# Altium footprint library MY_LIB_Connectors_CONNFLY.PcbLib: 239 footprints (part 9 of 15)
Each footprint in its own frame and in the unit in brackets; x right, y up, seen from the top. Pads: shape width x height; smd on the part's side, far side on the other; paste and mask are expansions set on the pad; w line width, h text height; cw(c..) or ccw(c..) is an arc to the next point about the centre after c.
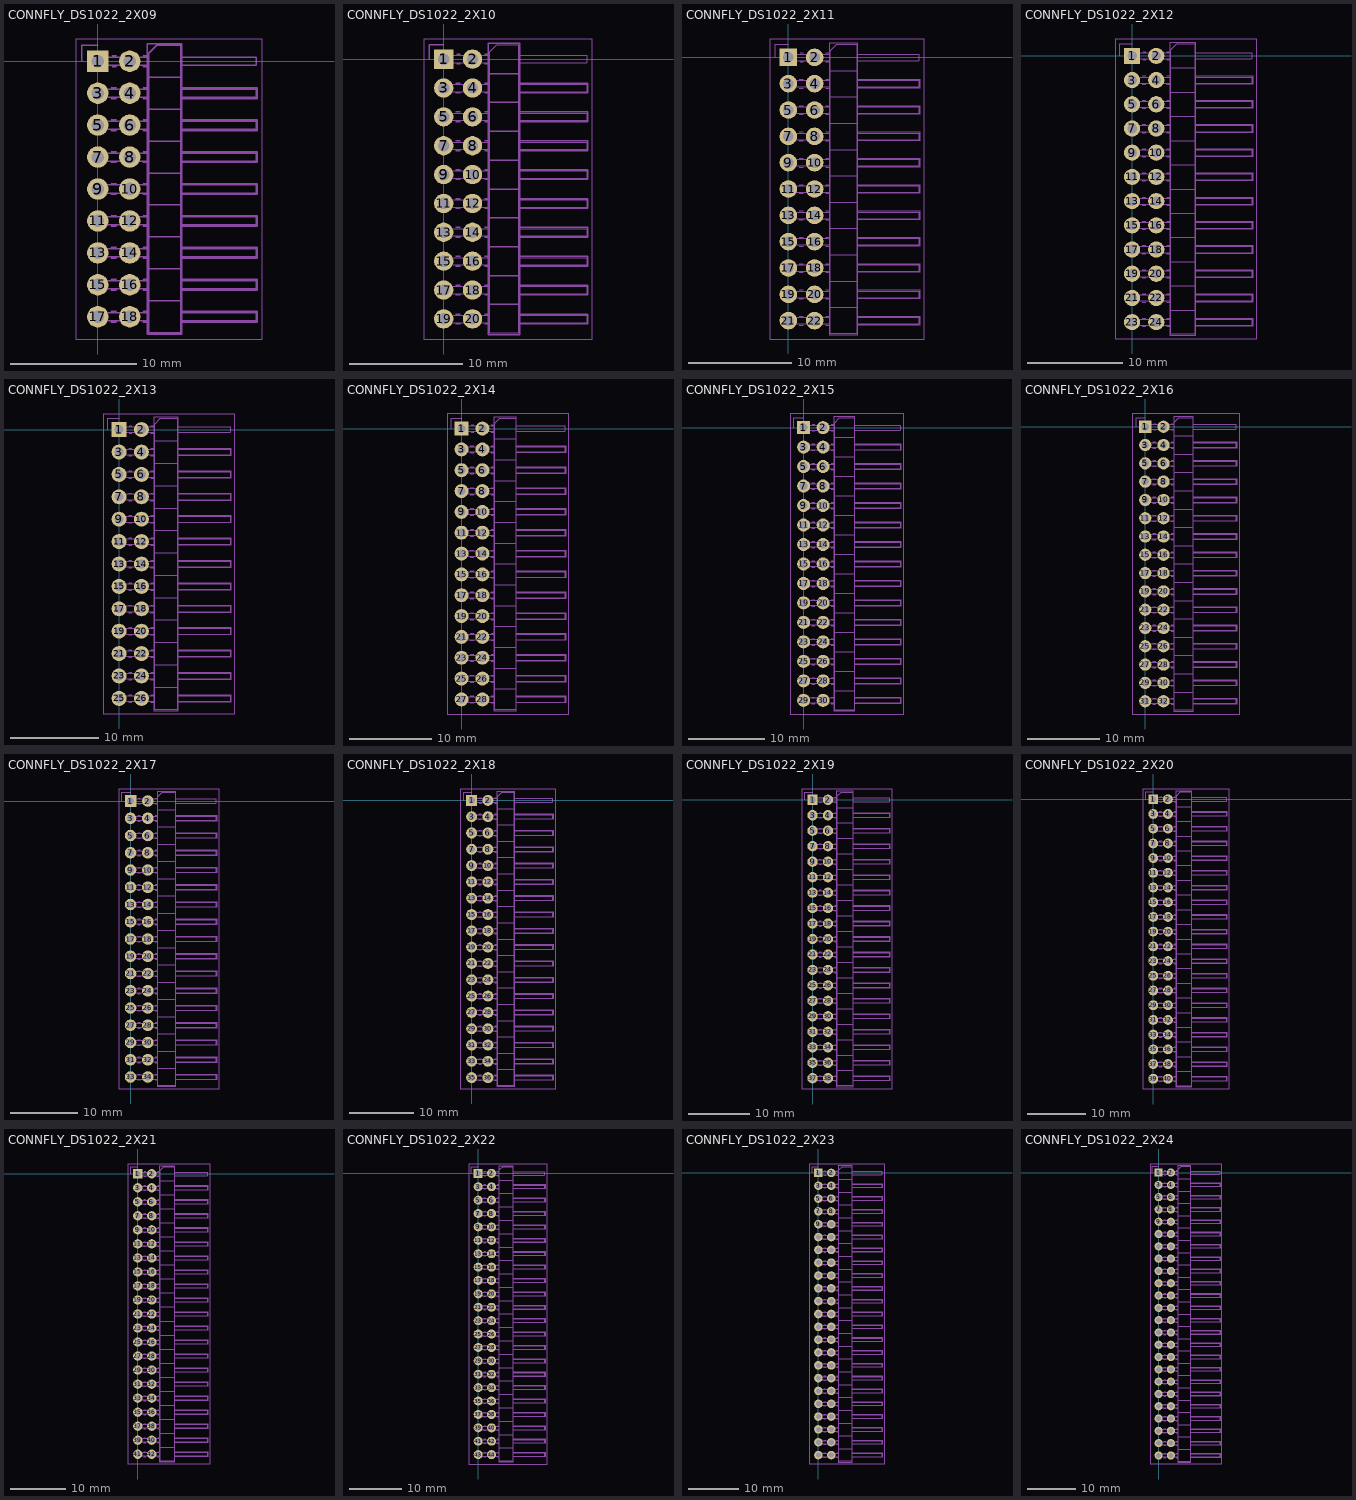
[diagram p8: the footprints below, top view; thin cyan lines are the x and y axes]

## CONNFLY_DS1022_2X09 [mm] "Connfly DS1022 2x9 standard KiCad; PTH1.0 pad1.7 pitch2.54; CC-BY-SA-4.0; STEP generic"
height 5.08
pads (18):
  rect 1.7x1.7 hole 1 paste-2539.97 mask+0.05: 1(0,0)
  round 1.7 hole 1 paste-2539.97 mask+0.05: 2(2.54,0) 3(0,-2.54) 4(2.54,-2.54) 5(0,-5.08) 6(2.54,-5.08) 7(0,-7.62) 8(2.54,-7.62) 9(0,-10.16) 10(2.54,-10.16) 11(0,-12.7) 12(2.54,-12.7) 13(0,-15.24) 14(2.54,-15.24) 15(0,-17.78) 16(2.54,-17.78) 17(0,-20.32) 18(2.54,-20.32)
Mechanical 15:
  lines w0.05: -1.77,-22.09 -1.77,1.77 13.09,1.77 13.09,-22.09 -1.77,-22.09
  lines w0.1: 4.04,-20.64 -0.32,-20.64 -0.32,-20 4.04,-20 ; 4.04,-18.1 -0.32,-18.1 -0.32,-17.46 4.04,-17.46 ; 4.04,-15.56 -0.32,-15.56 -0.32,-14.92 4.04,-14.92 ; 4.04,-13.02 -0.32,-13.02 -0.32,-12.38 4.04,-12.38 ; 4.04,-10.48 -0.32,-10.48 -0.32,-9.84 4.04,-9.84 ; 4.04,-7.94 -0.32,-7.94 -0.32,-7.3 4.04,-7.3 ; 4.04,-5.4 -0.32,-5.4 -0.32,-4.76 4.04,-4.76 ; 4.04,-2.86 -0.32,-2.86 -0.32,-2.22 4.04,-2.22 ; 4.04,-0.32 -0.32,-0.32 -0.32,0.32 4.04,0.32 ; 6.58,-20.64 12.58,-20.64 12.58,-20 6.58,-20 ; 6.58,-18.1 12.58,-18.1 12.58,-17.46 6.58,-17.46 ; 6.58,-15.56 12.58,-15.56 12.58,-14.92 6.58,-14.92 ; 6.58,-13.02 12.58,-13.02 12.58,-12.38 6.58,-12.38 ; 6.58,-10.48 12.58,-10.48 12.58,-9.84 6.58,-9.84 ; 6.58,-7.94 12.58,-7.94 12.58,-7.3 6.58,-7.3 ; 6.58,-5.4 12.58,-5.4 12.58,-4.76 6.58,-4.76 ; 6.58,-2.86 12.58,-2.86 12.58,-2.22 6.58,-2.22 ; 6.58,-0.32 12.58,-0.32 12.58,0.32 6.58,0.32 ; 4.04,-21.59 4.04,0.635 4.675,1.27 6.58,1.27 6.58,-21.59 4.04,-21.59
  lines w0.12: -1.27,0 -1.27,1.27 0,1.27 ; 1.077,-20.75 1.463,-20.75 ; 1.077,-19.89 1.463,-19.89 ; 1.077,-18.21 1.463,-18.21 ; 1.077,-17.35 1.463,-17.35 ; 1.077,-15.67 1.463,-15.67 ; 1.077,-14.81 1.463,-14.81 ; 1.077,-13.13 1.463,-13.13 ; 1.077,-12.27 1.463,-12.27 ; 1.077,-10.59 1.463,-10.59 ; 1.077,-9.73 1.463,-9.73 ; 1.077,-8.05 1.463,-8.05 ; 1.077,-7.19 1.463,-7.19 ; 1.077,-5.51 1.463,-5.51 ; 1.077,-4.65 1.463,-4.65 ; 1.077,-2.97 1.463,-2.97 ; 1.077,-2.11 1.463,-2.11 ; 1.16,-0.43 1.463,-0.43 ; 1.16,0.43 1.463,0.43 ; 3.617,-20.75 3.93,-20.75 ; 3.617,-19.89 3.93,-19.89 ; 3.617,-18.21 3.93,-18.21 ; 3.617,-17.35 3.93,-17.35 ; 3.617,-15.67 3.93,-15.67 ; 3.617,-14.81 3.93,-14.81 ; 3.617,-13.13 3.93,-13.13 ; 3.617,-12.27 3.93,-12.27 ; 3.617,-10.59 3.93,-10.59 ; 3.617,-9.73 3.93,-9.73 ; 3.617,-8.05 3.93,-8.05 ; 3.617,-7.19 3.93,-7.19 ; 3.617,-5.51 3.93,-5.51 ; 3.617,-4.65 3.93,-4.65 ; 3.617,-2.97 3.93,-2.97 ; 3.617,-2.11 3.93,-2.11 ; 3.617,-0.43 3.93,-0.43 ; 3.617,0.43 3.93,0.43 ; 3.93,-19.05 6.69,-19.05 ; 3.93,-16.51 6.69,-16.51 ; 3.93,-13.97 6.69,-13.97 ; 3.93,-11.43 6.69,-11.43 ; 3.93,-8.89 6.69,-8.89 ; 3.93,-6.35 6.69,-6.35 ; 3.93,-3.81 6.69,-3.81 ; 3.93,-1.27 6.69,-1.27 ; 6.69,-20.75 12.69,-20.75 12.69,-19.89 6.69,-19.89 ; 6.69,-18.21 12.69,-18.21 12.69,-17.35 6.69,-17.35 ; 6.69,-15.67 12.69,-15.67 12.69,-14.81 6.69,-14.81 ; 6.69,-13.13 12.69,-13.13 12.69,-12.27 6.69,-12.27 ; 6.69,-10.59 12.69,-10.59 12.69,-9.73 6.69,-9.73 ; 6.69,-8.05 12.69,-8.05 12.69,-7.19 6.69,-7.19 ; 6.69,-5.51 12.69,-5.51 12.69,-4.65 6.69,-4.65 ; 6.69,-2.97 12.69,-2.97 12.69,-2.11 6.69,-2.11 ; 3.93,-21.7 3.93,1.38 6.69,1.38 6.69,-21.7 3.93,-21.7
3D body "PinHeader_2x09_P2.54mm_Horizontal.step": height 5.08, standoff -3, extent -0.32,-21.59 12.58,1.27

## CONNFLY_DS1022_2X10 [mm] "Connfly DS1022 2x10 standard KiCad; PTH1.0 pad1.7 pitch2.54; CC-BY-SA-4.0; STEP generic"
height 5.08
pads (20):
  rect 1.7x1.7 hole 1 paste-2539.97 mask+0.05: 1(0,0)
  round 1.7 hole 1 paste-2539.97 mask+0.05: 2(2.54,0) 3(0,-2.54) 4(2.54,-2.54) 5(0,-5.08) 6(2.54,-5.08) 7(0,-7.62) 8(2.54,-7.62) 9(0,-10.16) 10(2.54,-10.16) 11(0,-12.7) 12(2.54,-12.7) 13(0,-15.24) 14(2.54,-15.24) 15(0,-17.78) 16(2.54,-17.78) 17(0,-20.32) 18(2.54,-20.32) 19(0,-22.86) 20(2.54,-22.86)
Mechanical 15:
  drawing of 151 lines, arcs and shapes, not listed
3D body "PinHeader_2x10_P2.54mm_Horizontal.step": height 5.08, standoff -3, extent -0.32,-24.13 12.58,1.27

## CONNFLY_DS1022_2X11 [mm] "Connfly DS1022 2x11 standard KiCad; PTH1.0 pad1.7 pitch2.54; CC-BY-SA-4.0; STEP generic"
height 5.08
pads (22):
  rect 1.7x1.7 hole 1 paste-2539.97 mask+0.05: 1(0,0)
  round 1.7 hole 1 paste-2539.97 mask+0.05: 2(2.54,0) 3(0,-2.54) 4(2.54,-2.54) 5(0,-5.08) 6(2.54,-5.08) 7(0,-7.62) 8(2.54,-7.62) 9(0,-10.16) 10(2.54,-10.16) 11(0,-12.7) 12(2.54,-12.7) 13(0,-15.24) 14(2.54,-15.24) 15(0,-17.78) 16(2.54,-17.78) 17(0,-20.32) 18(2.54,-20.32) 19(0,-22.86) 20(2.54,-22.86) 21(0,-25.4) 22(2.54,-25.4)
Mechanical 15:
  drawing of 165 lines, arcs and shapes, not listed
3D body "PinHeader_2x11_P2.54mm_Horizontal.step": height 5.08, standoff -3, extent -0.32,-26.67 12.58,1.27

## CONNFLY_DS1022_2X12 [mm] "Connfly DS1022 2x12 standard KiCad; PTH1.0 pad1.7 pitch2.54; CC-BY-SA-4.0; STEP generic"
height 5.08
pads (24):
  rect 1.7x1.7 hole 1 paste-2539.97 mask+0.05: 1(0,0)
  round 1.7 hole 1 paste-2539.97 mask+0.05: 2(2.54,0) 3(0,-2.54) 4(2.54,-2.54) 5(0,-5.08) 6(2.54,-5.08) 7(0,-7.62) 8(2.54,-7.62) 9(0,-10.16) 10(2.54,-10.16) 11(0,-12.7) 12(2.54,-12.7) 13(0,-15.24) 14(2.54,-15.24) 15(0,-17.78) 16(2.54,-17.78) 17(0,-20.32) 18(2.54,-20.32) 19(0,-22.86) 20(2.54,-22.86) 21(0,-25.4) 22(2.54,-25.4) 23(0,-27.94) 24(2.54,-27.94)
Mechanical 15:
  drawing of 179 lines, arcs and shapes, not listed
3D body "PinHeader_2x12_P2.54mm_Horizontal.step": height 5.08, standoff -3, extent -0.32,-29.21 12.58,1.27

## CONNFLY_DS1022_2X13 [mm] "Connfly DS1022 2x13 standard KiCad; PTH1.0 pad1.7 pitch2.54; CC-BY-SA-4.0; STEP generic"
height 5.08
pads (26):
  rect 1.7x1.7 hole 1 paste-2539.97 mask+0.05: 1(0,0)
  round 1.7 hole 1 paste-2539.97 mask+0.05: 2(2.54,0) 3(0,-2.54) 4(2.54,-2.54) 5(0,-5.08) 6(2.54,-5.08) 7(0,-7.62) 8(2.54,-7.62) 9(0,-10.16) 10(2.54,-10.16) 11(0,-12.7) 12(2.54,-12.7) 13(0,-15.24) 14(2.54,-15.24) 15(0,-17.78) 16(2.54,-17.78) 17(0,-20.32) 18(2.54,-20.32) 19(0,-22.86) 20(2.54,-22.86) 21(0,-25.4) 22(2.54,-25.4) 23(0,-27.94) 24(2.54,-27.94) 25(0,-30.48) 26(2.54,-30.48)
Mechanical 15:
  drawing of 193 lines, arcs and shapes, not listed
3D body "PinHeader_2x13_P2.54mm_Horizontal.step": height 5.08, standoff -3, extent -0.32,-31.75 12.58,1.27

## CONNFLY_DS1022_2X14 [mm] "Connfly DS1022 2x14 standard KiCad; PTH1.0 pad1.7 pitch2.54; CC-BY-SA-4.0; STEP generic"
height 5.08
pads (28):
  rect 1.7x1.7 hole 1 paste-2539.97 mask+0.05: 1(0,0)
  round 1.7 hole 1 paste-2539.97 mask+0.05: 2(2.54,0) 3(0,-2.54) 4(2.54,-2.54) 5(0,-5.08) 6(2.54,-5.08) 7(0,-7.62) 8(2.54,-7.62) 9(0,-10.16) 10(2.54,-10.16) 11(0,-12.7) 12(2.54,-12.7) 13(0,-15.24) 14(2.54,-15.24) 15(0,-17.78) 16(2.54,-17.78) 17(0,-20.32) 18(2.54,-20.32) 19(0,-22.86) 20(2.54,-22.86) 21(0,-25.4) 22(2.54,-25.4) 23(0,-27.94) 24(2.54,-27.94) 25(0,-30.48) 26(2.54,-30.48) 27(0,-33.02) 28(2.54,-33.02)
Mechanical 15:
  drawing of 207 lines, arcs and shapes, not listed
3D body "PinHeader_2x14_P2.54mm_Horizontal.step": height 5.08, standoff -3, extent -0.32,-34.29 12.58,1.27

## CONNFLY_DS1022_2X15 [mm] "Connfly DS1022 2x15 standard KiCad; PTH1.0 pad1.7 pitch2.54; CC-BY-SA-4.0; STEP generic"
height 5.08
pads (30):
  rect 1.7x1.7 hole 1 paste-2539.97 mask+0.05: 1(0,0)
  round 1.7 hole 1 paste-2539.97 mask+0.05: 2(2.54,0) 3(0,-2.54) 4(2.54,-2.54) 5(0,-5.08) 6(2.54,-5.08) 7(0,-7.62) 8(2.54,-7.62) 9(0,-10.16) 10(2.54,-10.16) 11(0,-12.7) 12(2.54,-12.7) 13(0,-15.24) 14(2.54,-15.24) 15(0,-17.78) 16(2.54,-17.78) 17(0,-20.32) 18(2.54,-20.32) 19(0,-22.86) 20(2.54,-22.86) 21(0,-25.4) 22(2.54,-25.4) 23(0,-27.94) 24(2.54,-27.94) 25(0,-30.48) 26(2.54,-30.48) 27(0,-33.02) 28(2.54,-33.02) 29(0,-35.56) 30(2.54,-35.56)
Mechanical 15:
  drawing of 221 lines, arcs and shapes, not listed
3D body "PinHeader_2x15_P2.54mm_Horizontal.step": height 5.08, standoff -3, extent -0.32,-36.83 12.58,1.27

## CONNFLY_DS1022_2X16 [mm] "Connfly DS1022 2x16 standard KiCad; PTH1.0 pad1.7 pitch2.54; CC-BY-SA-4.0; STEP generic"
height 5.08
pads (32):
  rect 1.7x1.7 hole 1 paste-2539.97 mask+0.05: 1(0,0)
  round 1.7 hole 1 paste-2539.97 mask+0.05: 2(2.54,0) 3(0,-2.54) 4(2.54,-2.54) 5(0,-5.08) 6(2.54,-5.08) 7(0,-7.62) 8(2.54,-7.62) 9(0,-10.16) 10(2.54,-10.16) 11(0,-12.7) 12(2.54,-12.7) 13(0,-15.24) 14(2.54,-15.24) 15(0,-17.78) 16(2.54,-17.78) 17(0,-20.32) 18(2.54,-20.32) 19(0,-22.86) 20(2.54,-22.86) 21(0,-25.4) 22(2.54,-25.4) 23(0,-27.94) 24(2.54,-27.94) 25(0,-30.48) 26(2.54,-30.48) 27(0,-33.02) 28(2.54,-33.02) 29(0,-35.56) 30(2.54,-35.56) 31(0,-38.1) 32(2.54,-38.1)
Mechanical 15:
  drawing of 235 lines, arcs and shapes, not listed
3D body "PinHeader_2x16_P2.54mm_Horizontal.step": height 5.08, standoff -3, extent -0.32,-39.37 12.58,1.27

## CONNFLY_DS1022_2X17 [mm] "Connfly DS1022 2x17 standard KiCad; PTH1.0 pad1.7 pitch2.54; CC-BY-SA-4.0; STEP generic"
height 5.08
pads (34):
  rect 1.7x1.7 hole 1 paste-2539.97 mask+0.05: 1(0,0)
  round 1.7 hole 1 paste-2539.97 mask+0.05: 2(2.54,0) 3(0,-2.54) 4(2.54,-2.54) 5(0,-5.08) 6(2.54,-5.08) 7(0,-7.62) 8(2.54,-7.62) 9(0,-10.16) 10(2.54,-10.16) 11(0,-12.7) 12(2.54,-12.7) 13(0,-15.24) 14(2.54,-15.24) 15(0,-17.78) 16(2.54,-17.78) 17(0,-20.32) 18(2.54,-20.32) 19(0,-22.86) 20(2.54,-22.86) 21(0,-25.4) 22(2.54,-25.4) 23(0,-27.94) 24(2.54,-27.94) 25(0,-30.48) 26(2.54,-30.48) 27(0,-33.02) 28(2.54,-33.02) 29(0,-35.56) 30(2.54,-35.56) 31(0,-38.1) 32(2.54,-38.1) 33(0,-40.64) 34(2.54,-40.64)
Mechanical 15:
  drawing of 249 lines, arcs and shapes, not listed
3D body "PinHeader_2x17_P2.54mm_Horizontal.step": height 5.08, standoff -3, extent -0.32,-41.91 12.58,1.27

## CONNFLY_DS1022_2X18 [mm] "Connfly DS1022 2x18 standard KiCad; PTH1.0 pad1.7 pitch2.54; CC-BY-SA-4.0; STEP generic"
height 5.08
pads (36):
  rect 1.7x1.7 hole 1 paste-2539.97 mask+0.05: 1(0,0)
  round 1.7 hole 1 paste-2539.97 mask+0.05: 2(2.54,0) 3(0,-2.54) 4(2.54,-2.54) 5(0,-5.08) 6(2.54,-5.08) 7(0,-7.62) 8(2.54,-7.62) 9(0,-10.16) 10(2.54,-10.16) 11(0,-12.7) 12(2.54,-12.7) 13(0,-15.24) 14(2.54,-15.24) 15(0,-17.78) 16(2.54,-17.78) 17(0,-20.32) 18(2.54,-20.32) 19(0,-22.86) 20(2.54,-22.86) 21(0,-25.4) 22(2.54,-25.4) 23(0,-27.94) 24(2.54,-27.94) 25(0,-30.48) 26(2.54,-30.48) 27(0,-33.02) 28(2.54,-33.02) 29(0,-35.56) 30(2.54,-35.56) 31(0,-38.1) 32(2.54,-38.1) 33(0,-40.64) 34(2.54,-40.64) 35(0,-43.18) 36(2.54,-43.18)
Mechanical 15:
  drawing of 263 lines, arcs and shapes, not listed
3D body "PinHeader_2x18_P2.54mm_Horizontal.step": height 5.08, standoff -3, extent -0.32,-44.45 12.58,1.27

## CONNFLY_DS1022_2X19 [mm] "Connfly DS1022 2x19 standard KiCad; PTH1.0 pad1.7 pitch2.54; CC-BY-SA-4.0; STEP generic"
height 5.08
pads (38):
  rect 1.7x1.7 hole 1 paste-2539.97 mask+0.05: 1(0,0)
  round 1.7 hole 1 paste-2539.97 mask+0.05: 2(2.54,0) 3(0,-2.54) 4(2.54,-2.54) 5(0,-5.08) 6(2.54,-5.08) 7(0,-7.62) 8(2.54,-7.62) 9(0,-10.16) 10(2.54,-10.16) 11(0,-12.7) 12(2.54,-12.7) 13(0,-15.24) 14(2.54,-15.24) 15(0,-17.78) 16(2.54,-17.78) 17(0,-20.32) 18(2.54,-20.32) 19(0,-22.86) 20(2.54,-22.86) 21(0,-25.4) 22(2.54,-25.4) 23(0,-27.94) 24(2.54,-27.94) 25(0,-30.48) 26(2.54,-30.48) 27(0,-33.02) 28(2.54,-33.02) 29(0,-35.56) 30(2.54,-35.56) 31(0,-38.1) 32(2.54,-38.1) 33(0,-40.64) 34(2.54,-40.64) 35(0,-43.18) 36(2.54,-43.18) 37(0,-45.72) 38(2.54,-45.72)
Mechanical 15:
  drawing of 277 lines, arcs and shapes, not listed
3D body "PinHeader_2x19_P2.54mm_Horizontal.step": height 5.08, standoff -3, extent -0.32,-46.99 12.58,1.27

## CONNFLY_DS1022_2X20 [mm] "Connfly DS1022 2x20 standard KiCad; PTH1.0 pad1.7 pitch2.54; CC-BY-SA-4.0; STEP generic"
height 5.08
pads (40):
  rect 1.7x1.7 hole 1 paste-2539.97 mask+0.05: 1(0,0)
  round 1.7 hole 1 paste-2539.97 mask+0.05: 2(2.54,0) 3(0,-2.54) 4(2.54,-2.54) 5(0,-5.08) 6(2.54,-5.08) 7(0,-7.62) 8(2.54,-7.62) 9(0,-10.16) 10(2.54,-10.16) 11(0,-12.7) 12(2.54,-12.7) 13(0,-15.24) 14(2.54,-15.24) 15(0,-17.78) 16(2.54,-17.78) 17(0,-20.32) 18(2.54,-20.32) 19(0,-22.86) 20(2.54,-22.86) 21(0,-25.4) 22(2.54,-25.4) 23(0,-27.94) 24(2.54,-27.94) 25(0,-30.48) 26(2.54,-30.48) 27(0,-33.02) 28(2.54,-33.02) 29(0,-35.56) 30(2.54,-35.56) 31(0,-38.1) 32(2.54,-38.1) 33(0,-40.64) 34(2.54,-40.64) 35(0,-43.18) 36(2.54,-43.18) 37(0,-45.72) 38(2.54,-45.72) 39(0,-48.26) 40(2.54,-48.26)
Mechanical 15:
  drawing of 291 lines, arcs and shapes, not listed
3D body "PinHeader_2x20_P2.54mm_Horizontal.step": height 5.08, standoff -3, extent -0.32,-49.53 12.58,1.27

## CONNFLY_DS1022_2X21 [mm] "Connfly DS1022 2x21 standard KiCad; PTH1.0 pad1.7 pitch2.54; CC-BY-SA-4.0; STEP generic"
height 5.08
pads (42):
  rect 1.7x1.7 hole 1 paste-2539.97 mask+0.05: 1(0,0)
  round 1.7 hole 1 paste-2539.97 mask+0.05: 2(2.54,0) 3(0,-2.54) 4(2.54,-2.54) 5(0,-5.08) 6(2.54,-5.08) 7(0,-7.62) 8(2.54,-7.62) 9(0,-10.16) 10(2.54,-10.16) 11(0,-12.7) 12(2.54,-12.7) 13(0,-15.24) 14(2.54,-15.24) 15(0,-17.78) 16(2.54,-17.78) 17(0,-20.32) 18(2.54,-20.32) 19(0,-22.86) 20(2.54,-22.86) 21(0,-25.4) 22(2.54,-25.4) 23(0,-27.94) 24(2.54,-27.94) 25(0,-30.48) 26(2.54,-30.48) 27(0,-33.02) 28(2.54,-33.02) 29(0,-35.56) 30(2.54,-35.56) 31(0,-38.1) 32(2.54,-38.1) 33(0,-40.64) 34(2.54,-40.64) 35(0,-43.18) 36(2.54,-43.18) 37(0,-45.72) 38(2.54,-45.72) 39(0,-48.26) 40(2.54,-48.26) 41(0,-50.8) 42(2.54,-50.8)
Mechanical 15:
  drawing of 305 lines, arcs and shapes, not listed
3D body "PinHeader_2x21_P2.54mm_Horizontal.step": height 5.08, standoff -3, extent -0.32,-52.07 12.58,1.27

## CONNFLY_DS1022_2X22 [mm] "Connfly DS1022 2x22 standard KiCad; PTH1.0 pad1.7 pitch2.54; CC-BY-SA-4.0; STEP generic"
height 5.08
pads (44):
  rect 1.7x1.7 hole 1 paste-2539.97 mask+0.05: 1(0,0)
  round 1.7 hole 1 paste-2539.97 mask+0.05: 2(2.54,0) 3(0,-2.54) 4(2.54,-2.54) 5(0,-5.08) 6(2.54,-5.08) 7(0,-7.62) 8(2.54,-7.62) 9(0,-10.16) 10(2.54,-10.16) 11(0,-12.7) 12(2.54,-12.7) 13(0,-15.24) 14(2.54,-15.24) 15(0,-17.78) 16(2.54,-17.78) 17(0,-20.32) 18(2.54,-20.32) 19(0,-22.86) 20(2.54,-22.86) 21(0,-25.4) 22(2.54,-25.4) 23(0,-27.94) 24(2.54,-27.94) 25(0,-30.48) 26(2.54,-30.48) 27(0,-33.02) 28(2.54,-33.02) 29(0,-35.56) 30(2.54,-35.56) 31(0,-38.1) 32(2.54,-38.1) 33(0,-40.64) 34(2.54,-40.64) 35(0,-43.18) 36(2.54,-43.18) 37(0,-45.72) 38(2.54,-45.72) 39(0,-48.26) 40(2.54,-48.26) 41(0,-50.8) 42(2.54,-50.8) 43(0,-53.34) 44(2.54,-53.34)
Mechanical 15:
  drawing of 319 lines, arcs and shapes, not listed
3D body "PinHeader_2x22_P2.54mm_Horizontal.step": height 5.08, standoff -3, extent -0.32,-54.61 12.58,1.27

## CONNFLY_DS1022_2X23 [mm] "Connfly DS1022 2x23 standard KiCad; PTH1.0 pad1.7 pitch2.54; CC-BY-SA-4.0; STEP generic"
height 5.08
pads (46):
  rect 1.7x1.7 hole 1 paste-2539.97 mask+0.05: 1(0,0)
  round 1.7 hole 1 paste-2539.97 mask+0.05: 2(2.54,0) 3(0,-2.54) 4(2.54,-2.54) 5(0,-5.08) 6(2.54,-5.08) 7(0,-7.62) 8(2.54,-7.62) 9(0,-10.16) 10(2.54,-10.16) 11(0,-12.7) 12(2.54,-12.7) 13(0,-15.24) 14(2.54,-15.24) 15(0,-17.78) 16(2.54,-17.78) 17(0,-20.32) 18(2.54,-20.32) 19(0,-22.86) 20(2.54,-22.86) 21(0,-25.4) 22(2.54,-25.4) 23(0,-27.94) 24(2.54,-27.94) 25(0,-30.48) 26(2.54,-30.48) 27(0,-33.02) 28(2.54,-33.02) 29(0,-35.56) 30(2.54,-35.56) 31(0,-38.1) 32(2.54,-38.1) 33(0,-40.64) 34(2.54,-40.64) 35(0,-43.18) 36(2.54,-43.18) 37(0,-45.72) 38(2.54,-45.72) 39(0,-48.26) 40(2.54,-48.26) 41(0,-50.8) 42(2.54,-50.8) 43(0,-53.34) 44(2.54,-53.34) 45(0,-55.88) 46(2.54,-55.88)
Mechanical 15:
  drawing of 333 lines, arcs and shapes, not listed
3D body "PinHeader_2x23_P2.54mm_Horizontal.step": height 5.08, standoff -3, extent -0.32,-57.15 12.58,1.27

## CONNFLY_DS1022_2X24 [mm] "Connfly DS1022 2x24 standard KiCad; PTH1.0 pad1.7 pitch2.54; CC-BY-SA-4.0; STEP generic"
height 5.08
pads (48):
  rect 1.7x1.7 hole 1 paste-2539.97 mask+0.05: 1(0,0)
  round 1.7 hole 1 paste-2539.97 mask+0.05: 2(2.54,0) 3(0,-2.54) 4(2.54,-2.54) 5(0,-5.08) 6(2.54,-5.08) 7(0,-7.62) 8(2.54,-7.62) 9(0,-10.16) 10(2.54,-10.16) 11(0,-12.7) 12(2.54,-12.7) 13(0,-15.24) 14(2.54,-15.24) 15(0,-17.78) 16(2.54,-17.78) 17(0,-20.32) 18(2.54,-20.32) 19(0,-22.86) 20(2.54,-22.86) 21(0,-25.4) 22(2.54,-25.4) 23(0,-27.94) 24(2.54,-27.94) 25(0,-30.48) 26(2.54,-30.48) 27(0,-33.02) 28(2.54,-33.02) 29(0,-35.56) 30(2.54,-35.56) 31(0,-38.1) 32(2.54,-38.1) 33(0,-40.64) 34(2.54,-40.64) 35(0,-43.18) 36(2.54,-43.18) 37(0,-45.72) 38(2.54,-45.72) 39(0,-48.26) 40(2.54,-48.26) 41(0,-50.8) 42(2.54,-50.8) 43(0,-53.34) 44(2.54,-53.34) 45(0,-55.88) 46(2.54,-55.88) 47(0,-58.42) 48(2.54,-58.42)
Mechanical 15:
  drawing of 347 lines, arcs and shapes, not listed
3D body "PinHeader_2x24_P2.54mm_Horizontal.step": height 5.08, standoff -3, extent -0.32,-59.69 12.58,1.27